# Altium footprint library FootPrintLib_7.PcbLib: 358 footprints (part 2 of 24)
Each footprint in its own frame and in the unit in brackets; x right, y up, seen from the top. Pads: shape width x height; smd on the part's side, far side on the other; paste and mask are expansions set on the pad; w line width, h text height; cw(c..) or ccw(c..) is an arc to the next point about the centre after c.
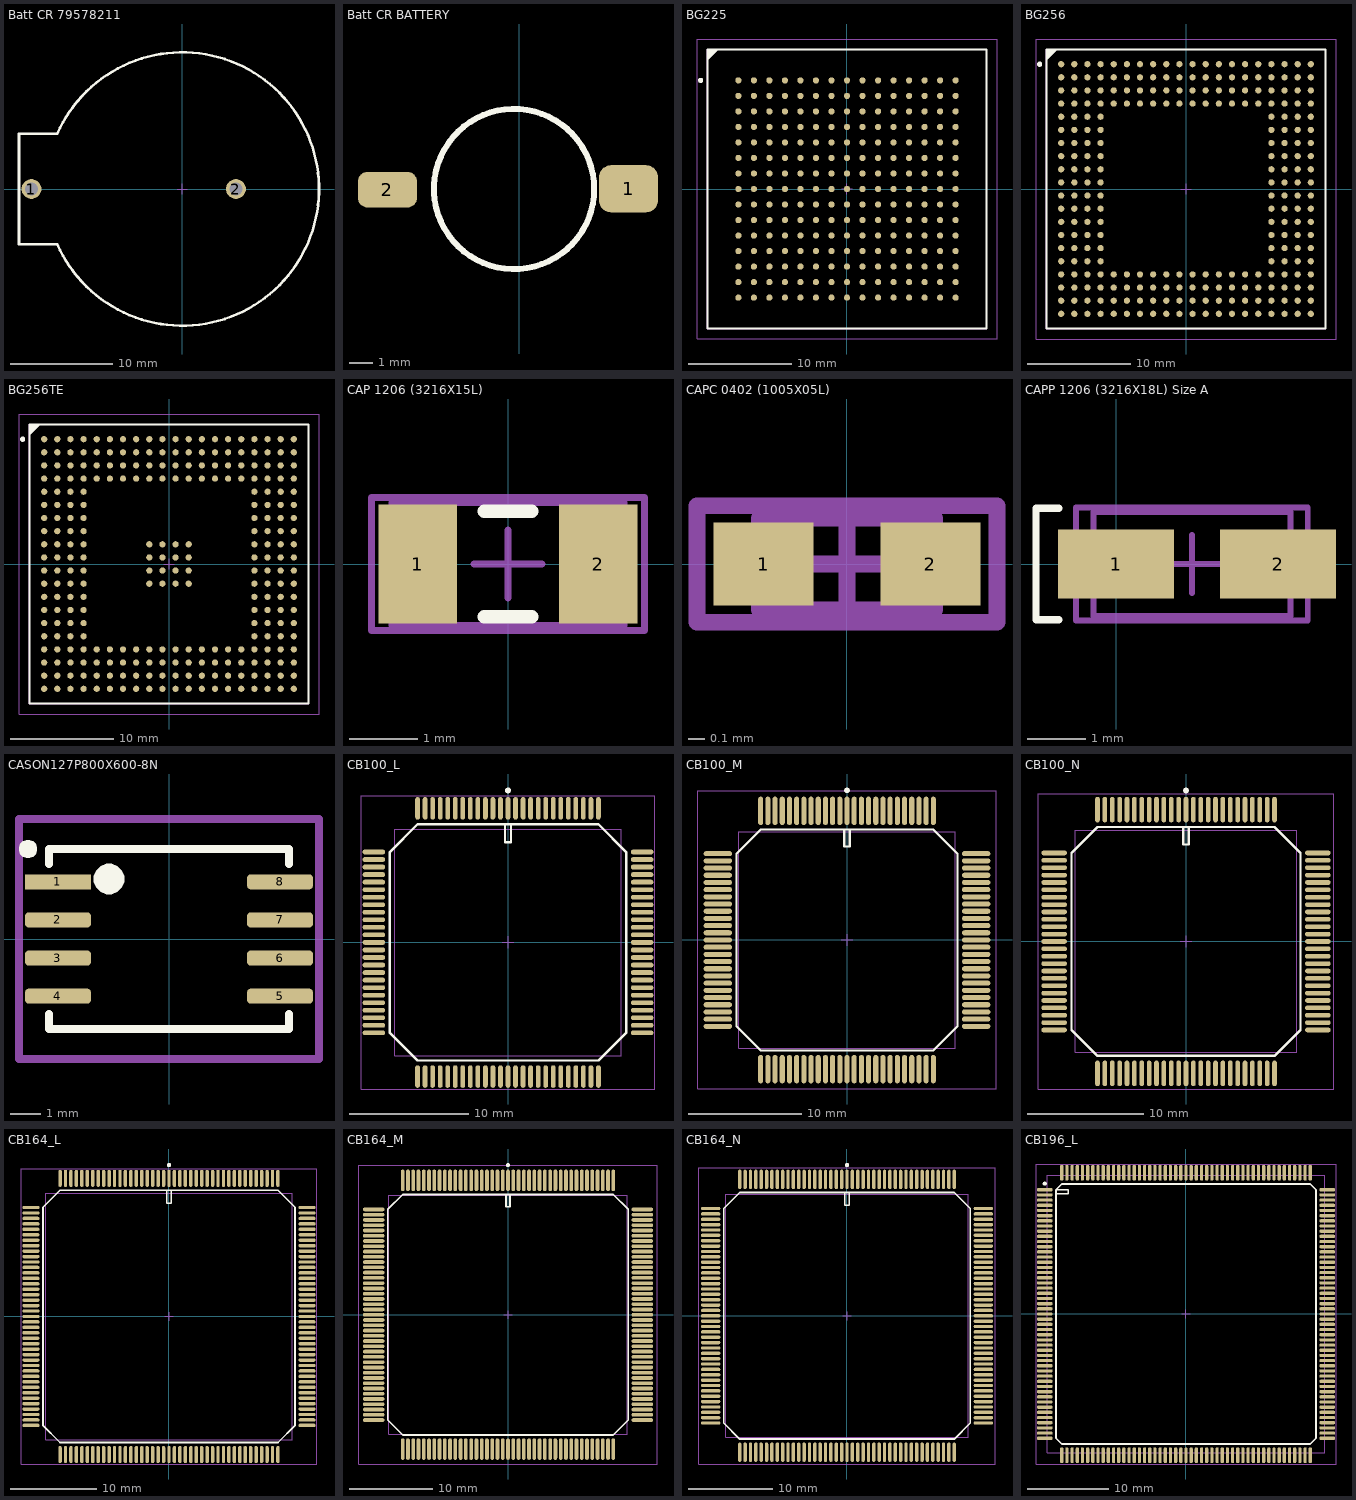
[diagram p1: the footprints below, top view; thin cyan lines are the x and y axes]

## Batt CR 79578211 [mm] "Battery Holder"
height 9.5
pads (2):
  round 1.95 hole 1.3: 1(-14.755,0) 2(5.245,0)
Top Overlay:
  lines w0.254: -12.236,-5.4 ccw(c0,0) -12.237,5.399 ; -12.237,5.4 -15.975,5.4 -15.975,-5.4 -12.236,-5.4
Mechanical 15:
  lines w0.1: -0.5,0 0.5,0 ; 0,-0.5 0,0.5
3D body "79578211.stp": height 9.6, standoff -3.2, extent -15.97,-13.375 13.327,13.375

## Batt CR BATTERY [mm]
pads (2):
  rrect50% 2.5x2 smd: 1(4.63,10.69)
  rrect50% 2.5x1.5 smd: 2(-5.6,10.65)
Top Overlay:
  circle w0.254: c-0.228,10.68 r3.4
3D body "battery_capacitor.STEP": height 2.07, standoff -0.01, extent -6.12,7.3 5.45,14.1

## BG225 [mm] "225-Ball Plastic Ball Grid Array (BG225)"
height 2.3
pads (225):
  round 0.6 smd: A1(-10.5,10.5) A2(-9,10.5) A3(-7.5,10.5) A4(-6,10.5) A5(-4.5,10.5) A6(-3,10.5) A7(-1.5,10.5) A8(0,10.5) A9(1.5,10.5) A10(3,10.5) A11(4.5,10.5) A12(6,10.5) A13(7.5,10.5) A14(9,10.5) A15(10.5,10.5) B1(-10.5,9) B2(-9,9) B3(-7.5,9) B4(-6,9) B5(-4.5,9) B6(-3,9) B7(-1.5,9) B8(0,9) B9(1.5,9) B10(3,9) B11(4.5,9) B12(6,9) B13(7.5,9) B14(9,9) B15(10.5,9) C1(-10.5,7.5) C2(-9,7.5) C3(-7.5,7.5) C4(-6,7.5) C5(-4.5,7.5) C6(-3,7.5) C7(-1.5,7.5) C8(0,7.5) C9(1.5,7.5) C10(3,7.5) C11(4.5,7.5) C12(6,7.5) C13(7.5,7.5) C14(9,7.5) C15(10.5,7.5) D1(-10.5,6) D2(-9,6) D3(-7.5,6) D4(-6,6) D5(-4.5,6) D6(-3,6) D7(-1.5,6) D8(0,6) D9(1.5,6) D10(3,6) D11(4.5,6) D12(6,6) D13(7.5,6) D14(9,6) D15(10.5,6) E1(-10.5,4.5) E2(-9,4.5) E3(-7.5,4.5) E4(-6,4.5) E5(-4.5,4.5) E6(-3,4.5) E7(-1.5,4.5) E8(0,4.5) E9(1.5,4.5) E10(3,4.5) E11(4.5,4.5) E12(6,4.5) E13(7.5,4.5) E14(9,4.5) E15(10.5,4.5) F1(-10.5,3) F2(-9,3) F3(-7.5,3) F4(-6,3) F5(-4.5,3) F6(-3,3) F7(-1.5,3) F8(0,3) F9(1.5,3) F10(3,3) F11(4.5,3) F12(6,3) F13(7.5,3) F14(9,3) F15(10.5,3) G1(-10.5,1.5) G2(-9,1.5) G3(-7.5,1.5) G4(-6,1.5) G5(-4.5,1.5) G6(-3,1.5) G7(-1.5,1.5) G8(0,1.5) G9(1.5,1.5) G10(3,1.5) G11(4.5,1.5) G12(6,1.5) G13(7.5,1.5) G14(9,1.5) G15(10.5,1.5) H1(-10.5,0) H2(-9,0) H3(-7.5,0) H4(-6,0) H5(-4.5,0) H6(-3,0) H7(-1.5,0) H8(0,0) H9(1.5,0) H10(3,0) H11(4.5,0) H12(6,0) H13(7.5,0) H14(9,0) H15(10.5,0) J1(-10.5,-1.5) J2(-9,-1.5) J3(-7.5,-1.5) J4(-6,-1.5) J5(-4.5,-1.5) J6(-3,-1.5) J7(-1.5,-1.5) J8(0,-1.5) J9(1.5,-1.5) J10(3,-1.5) J11(4.5,-1.5) J12(6,-1.5) J13(7.5,-1.5) J14(9,-1.5) J15(10.5,-1.5) K1(-10.5,-3) K2(-9,-3) K3(-7.5,-3) K4(-6,-3) K5(-4.5,-3) K6(-3,-3) K7(-1.5,-3) K8(0,-3) K9(1.5,-3) K10(3,-3) K11(4.5,-3) K12(6,-3) K13(7.5,-3) K14(9,-3) K15(10.5,-3) L1(-10.5,-4.5) L2(-9,-4.5) L3(-7.5,-4.5) L4(-6,-4.5) L5(-4.5,-4.5) L6(-3,-4.5) L7(-1.5,-4.5) L8(0,-4.5) L9(1.5,-4.5) L10(3,-4.5) L11(4.5,-4.5) L12(6,-4.5) L13(7.5,-4.5) L14(9,-4.5) L15(10.5,-4.5) M1(-10.5,-6) M2(-9,-6) M3(-7.5,-6) M4(-6,-6) M5(-4.5,-6) M6(-3,-6) M7(-1.5,-6) M8(0,-6) M9(1.5,-6) M10(3,-6) M11(4.5,-6) M12(6,-6) M13(7.5,-6) M14(9,-6) M15(10.5,-6) N1(-10.5,-7.5) N2(-9,-7.5) N3(-7.5,-7.5) N4(-6,-7.5) N5(-4.5,-7.5) N6(-3,-7.5) N7(-1.5,-7.5) N8(0,-7.5) N9(1.5,-7.5) N10(3,-7.5) N11(4.5,-7.5) N12(6,-7.5) N13(7.5,-7.5) N14(9,-7.5) N15(10.5,-7.5) P1(-10.5,-9) P2(-9,-9) P3(-7.5,-9) P4(-6,-9) P5(-4.5,-9) P6(-3,-9) P7(-1.5,-9) P8(0,-9) P9(1.5,-9) P10(3,-9) P11(4.5,-9) P12(6,-9) P13(7.5,-9) P14(9,-9) P15(10.5,-9) R1(-10.5,-10.5) R2(-9,-10.5) R3(-7.5,-10.5) R4(-6,-10.5) R5(-4.5,-10.5) R6(-3,-10.5) R7(-1.5,-10.5) R8(0,-10.5) R9(1.5,-10.5) R10(3,-10.5) R11(4.5,-10.5) R12(6,-10.5) R13(7.5,-10.5) R14(9,-10.5) R15(10.5,-10.5)
Top Overlay:
  circle w0.25: c-14.15,10.5 r0.125
  region: -12.5,13.5 -13.5,12.5 -13.5,13.5
  lines w0.2: -13.5,12.5 -12.5,13.5 ; -13.5,-13.5 -13.5,13.5 13.5,13.5 13.5,-13.5 -13.5,-13.5
Mechanical 13:
  lines w0.1: -13.5,-13.5 -13.5,13.5 13.5,13.5 13.5,-13.5 -13.5,-13.5
Mechanical 15:
  lines w0.1: -0.5,0 0.5,0 ; 0,-0.5 0,0.5 ; -14.5,-14.5 -14.5,14.5 14.5,14.5 14.5,-14.5 -14.5,-14.5
3D body: height 2.3, standoff 0, extent -13.5,-13.5 13.5,13.5

## BG256 [mm] "256-Ball Plastic Ball Grid Array (BG256)"
height 2.55
pads (256):
  round 0.6 smd: A1(-12.065,12.065) A2(-10.795,12.065) A3(-9.525,12.065) A4(-8.255,12.065) A5(-6.985,12.065) A6(-5.715,12.065) A7(-4.445,12.065) A8(-3.175,12.065) A9(-1.905,12.065) A10(-0.635,12.065) A11(0.635,12.065) A12(1.905,12.065) A13(3.175,12.065) A14(4.445,12.065) A15(5.715,12.065) A16(6.985,12.065) A17(8.255,12.065) A18(9.525,12.065) A19(10.795,12.065) A20(12.065,12.065) B1(-12.065,10.795) B2(-10.795,10.795) B3(-9.525,10.795) B4(-8.255,10.795) B5(-6.985,10.795) B6(-5.715,10.795) B7(-4.445,10.795) B8(-3.175,10.795) B9(-1.905,10.795) B10(-0.635,10.795) B11(0.635,10.795) B12(1.905,10.795) B13(3.175,10.795) B14(4.445,10.795) B15(5.715,10.795) B16(6.985,10.795) B17(8.255,10.795) B18(9.525,10.795) B19(10.795,10.795) B20(12.065,10.795) C1(-12.065,9.525) C2(-10.795,9.525) C3(-9.525,9.525) C4(-8.255,9.525) C5(-6.985,9.525) C6(-5.715,9.525) C7(-4.445,9.525) C8(-3.175,9.525) C9(-1.905,9.525) C10(-0.635,9.525) C11(0.635,9.525) C12(1.905,9.525) C13(3.175,9.525) C14(4.445,9.525) C15(5.715,9.525) C16(6.985,9.525) C17(8.255,9.525) C18(9.525,9.525) C19(10.795,9.525) C20(12.065,9.525) D1(-12.065,8.255) D2(-10.795,8.255) D3(-9.525,8.255) D4(-8.255,8.255) D5(-6.985,8.255) D6(-5.715,8.255) D7(-4.445,8.255) D8(-3.175,8.255) D9(-1.905,8.255) D10(-0.635,8.255) D11(0.635,8.255) D12(1.905,8.255) D13(3.175,8.255) D14(4.445,8.255) D15(5.715,8.255) D16(6.985,8.255) D17(8.255,8.255) D18(9.525,8.255) D19(10.795,8.255) D20(12.065,8.255) E1(-12.065,6.985) E2(-10.795,6.985) E3(-9.525,6.985) E4(-8.255,6.985) E17(8.255,6.985) E18(9.525,6.985) E19(10.795,6.985) E20(12.065,6.985) F1(-12.065,5.715) F2(-10.795,5.715) F3(-9.525,5.715) F4(-8.255,5.715) F17(8.255,5.715) F18(9.525,5.715) F19(10.795,5.715) F20(12.065,5.715) G1(-12.065,4.445) G2(-10.795,4.445) G3(-9.525,4.445) G4(-8.255,4.445) G17(8.255,4.445) G18(9.525,4.445) G19(10.795,4.445) G20(12.065,4.445) H1(-12.065,3.175) H2(-10.795,3.175) H3(-9.525,3.175) H4(-8.255,3.175) H17(8.255,3.175) H18(9.525,3.175) H19(10.795,3.175) H20(12.065,3.175) J1(-12.065,1.905) J2(-10.795,1.905) J3(-9.525,1.905) J4(-8.255,1.905) J17(8.255,1.905) J18(9.525,1.905) J19(10.795,1.905) J20(12.065,1.905) K1(-12.065,0.635) K2(-10.795,0.635) K3(-9.525,0.635) K4(-8.255,0.635) K17(8.255,0.635) K18(9.525,0.635) K19(10.795,0.635) K20(12.065,0.635) L1(-12.065,-0.635) L2(-10.795,-0.635) L3(-9.525,-0.635) L4(-8.255,-0.635) L17(8.255,-0.635) L18(9.525,-0.635) L19(10.795,-0.635) L20(12.065,-0.635) M1(-12.065,-1.905) M2(-10.795,-1.905) M3(-9.525,-1.905) M4(-8.255,-1.905) M17(8.255,-1.905) M18(9.525,-1.905) M19(10.795,-1.905) M20(12.065,-1.905) N1(-12.065,-3.175) N2(-10.795,-3.175) N3(-9.525,-3.175) N4(-8.255,-3.175) N17(8.255,-3.175) N18(9.525,-3.175) N19(10.795,-3.175) N20(12.065,-3.175) P1(-12.065,-4.445) P2(-10.795,-4.445) P3(-9.525,-4.445) P4(-8.255,-4.445) P17(8.255,-4.445) P18(9.525,-4.445) P19(10.795,-4.445) P20(12.065,-4.445) R1(-12.065,-5.715) R2(-10.795,-5.715) R3(-9.525,-5.715) R4(-8.255,-5.715) R17(8.255,-5.715) R18(9.525,-5.715) R19(10.795,-5.715) R20(12.065,-5.715) T1(-12.065,-6.985) T2(-10.795,-6.985) T3(-9.525,-6.985) T4(-8.255,-6.985) T17(8.255,-6.985) T18(9.525,-6.985) T19(10.795,-6.985) T20(12.065,-6.985) U1(-12.065,-8.255) U2(-10.795,-8.255) U3(-9.525,-8.255) U4(-8.255,-8.255) U5(-6.985,-8.255) U6(-5.715,-8.255) U7(-4.445,-8.255) U8(-3.175,-8.255) U9(-1.905,-8.255) U10(-0.635,-8.255) U11(0.635,-8.255) U12(1.905,-8.255) U13(3.175,-8.255) U14(4.445,-8.255) U15(5.715,-8.255) U16(6.985,-8.255) U17(8.255,-8.255) U18(9.525,-8.255) U19(10.795,-8.255) U20(12.065,-8.255) V1(-12.065,-9.525) V2(-10.795,-9.525) V3(-9.525,-9.525) V4(-8.255,-9.525) V5(-6.985,-9.525) V6(-5.715,-9.525) V7(-4.445,-9.525) V8(-3.175,-9.525) V9(-1.905,-9.525) V10(-0.635,-9.525) V11(0.635,-9.525) V12(1.905,-9.525) V13(3.175,-9.525) V14(4.445,-9.525) V15(5.715,-9.525) V16(6.985,-9.525) V17(8.255,-9.525) V18(9.525,-9.525) V19(10.795,-9.525) V20(12.065,-9.525) W1(-12.065,-10.795) W2(-10.795,-10.795) W3(-9.525,-10.795) W4(-8.255,-10.795) W5(-6.985,-10.795) W6(-5.715,-10.795) W7(-4.445,-10.795) W8(-3.175,-10.795) W9(-1.905,-10.795) W10(-0.635,-10.795) W11(0.635,-10.795) W12(1.905,-10.795) W13(3.175,-10.795) W14(4.445,-10.795) W15(5.715,-10.795) W16(6.985,-10.795) W17(8.255,-10.795) W18(9.525,-10.795) W19(10.795,-10.795) W20(12.065,-10.795) Y1(-12.065,-12.065) Y2(-10.795,-12.065) Y3(-9.525,-12.065) Y4(-8.255,-12.065) Y5(-6.985,-12.065) Y6(-5.715,-12.065) Y7(-4.445,-12.065) Y8(-3.175,-12.065) Y9(-1.905,-12.065) Y10(-0.635,-12.065) Y11(0.635,-12.065) Y12(1.905,-12.065) Y13(3.175,-12.065) Y14(4.445,-12.065) Y15(5.715,-12.065) Y16(6.985,-12.065) Y17(8.255,-12.065) Y18(9.525,-12.065) Y19(10.795,-12.065) Y20(12.065,-12.065)
Top Overlay:
  circle w0.25: c-14.15,12.065 r0.125
  region: -12.5,13.5 -13.5,12.5 -13.5,13.5
  lines w0.2: -13.5,12.5 -12.5,13.5 ; -13.5,-13.5 -13.5,13.5 13.5,13.5 13.5,-13.5 -13.5,-13.5
Mechanical 13:
  lines w0.1: -13.5,-13.5 -13.5,13.5 13.5,13.5 13.5,-13.5 -13.5,-13.5
Mechanical 15:
  lines w0.1: -0.5,0 0.5,0 ; 0,-0.5 0,0.5 ; -14.5,-14.5 -14.5,14.5 14.5,14.5 14.5,-14.5 -14.5,-14.5
3D body: height 2.55, standoff 0, extent -13.5,-13.5 13.5,13.5

## BG256TE [mm] "256-Ball Plastic Ball Grid Array (BG256) - Thermally Enhanced"
height 2.55
pads (272):
  round 0.6 smd: A1(-12.065,12.065) A2(-10.795,12.065) A3(-9.525,12.065) A4(-8.255,12.065) A5(-6.985,12.065) A6(-5.715,12.065) A7(-4.445,12.065) A8(-3.175,12.065) A9(-1.905,12.065) A10(-0.635,12.065) A11(0.635,12.065) A12(1.905,12.065) A13(3.175,12.065) A14(4.445,12.065) A15(5.715,12.065) A16(6.985,12.065) A17(8.255,12.065) A18(9.525,12.065) A19(10.795,12.065) A20(12.065,12.065) B1(-12.065,10.795) B2(-10.795,10.795) B3(-9.525,10.795) B4(-8.255,10.795) B5(-6.985,10.795) B6(-5.715,10.795) B7(-4.445,10.795) B8(-3.175,10.795) B9(-1.905,10.795) B10(-0.635,10.795) B11(0.635,10.795) B12(1.905,10.795) B13(3.175,10.795) B14(4.445,10.795) B15(5.715,10.795) B16(6.985,10.795) B17(8.255,10.795) B18(9.525,10.795) B19(10.795,10.795) B20(12.065,10.795) C1(-12.065,9.525) C2(-10.795,9.525) C3(-9.525,9.525) C4(-8.255,9.525) C5(-6.985,9.525) C6(-5.715,9.525) C7(-4.445,9.525) C8(-3.175,9.525) C9(-1.905,9.525) C10(-0.635,9.525) C11(0.635,9.525) C12(1.905,9.525) C13(3.175,9.525) C14(4.445,9.525) C15(5.715,9.525) C16(6.985,9.525) C17(8.255,9.525) C18(9.525,9.525) C19(10.795,9.525) C20(12.065,9.525) D1(-12.065,8.255) D2(-10.795,8.255) D3(-9.525,8.255) D4(-8.255,8.255) D5(-6.985,8.255) D6(-5.715,8.255) D7(-4.445,8.255) D8(-3.175,8.255) D9(-1.905,8.255) D10(-0.635,8.255) D11(0.635,8.255) D12(1.905,8.255) D13(3.175,8.255) D14(4.445,8.255) D15(5.715,8.255) D16(6.985,8.255) D17(8.255,8.255) D18(9.525,8.255) D19(10.795,8.255) D20(12.065,8.255) E1(-12.065,6.985) E2(-10.795,6.985) E3(-9.525,6.985) E4(-8.255,6.985) E17(8.255,6.985) E18(9.525,6.985) E19(10.795,6.985) E20(12.065,6.985) F1(-12.065,5.715) F2(-10.795,5.715) F3(-9.525,5.715) F4(-8.255,5.715) F17(8.255,5.715) F18(9.525,5.715) F19(10.795,5.715) F20(12.065,5.715) G1(-12.065,4.445) G2(-10.795,4.445) G3(-9.525,4.445) G4(-8.255,4.445) G17(8.255,4.445) G18(9.525,4.445) G19(10.795,4.445) G20(12.065,4.445) H1(-12.065,3.175) H2(-10.795,3.175) H3(-9.525,3.175) H4(-8.255,3.175) H17(8.255,3.175) H18(9.525,3.175) H19(10.795,3.175) H20(12.065,3.175) J1(-12.065,1.905) J2(-10.795,1.905) J3(-9.525,1.905) J4(-8.255,1.905) J9(-1.905,1.905) J10(-0.635,1.905) J11(0.635,1.905) J12(1.905,1.905) J17(8.255,1.905) J18(9.525,1.905) J19(10.795,1.905) J20(12.065,1.905) K1(-12.065,0.635) K2(-10.795,0.635) K3(-9.525,0.635) K4(-8.255,0.635) K9(-1.905,0.635) K10(-0.635,0.635) K11(0.635,0.635) K12(1.905,0.635) K17(8.255,0.635) K18(9.525,0.635) K19(10.795,0.635) K20(12.065,0.635) L1(-12.065,-0.635) L2(-10.795,-0.635) L3(-9.525,-0.635) L4(-8.255,-0.635) L9(-1.905,-0.635) L10(-0.635,-0.635) L11(0.635,-0.635) L12(1.905,-0.635) L17(8.255,-0.635) L18(9.525,-0.635) L19(10.795,-0.635) L20(12.065,-0.635) M1(-12.065,-1.905) M2(-10.795,-1.905) M3(-9.525,-1.905) M4(-8.255,-1.905) M9(-1.905,-1.905) M10(-0.635,-1.905) M11(0.635,-1.905) M12(1.905,-1.905) M17(8.255,-1.905) M18(9.525,-1.905) M19(10.795,-1.905) M20(12.065,-1.905) N1(-12.065,-3.175) N2(-10.795,-3.175) N3(-9.525,-3.175) N4(-8.255,-3.175) N17(8.255,-3.175) N18(9.525,-3.175) N19(10.795,-3.175) N20(12.065,-3.175) P1(-12.065,-4.445) P2(-10.795,-4.445) P3(-9.525,-4.445) P4(-8.255,-4.445) P17(8.255,-4.445) P18(9.525,-4.445) P19(10.795,-4.445) P20(12.065,-4.445) R1(-12.065,-5.715) R2(-10.795,-5.715) R3(-9.525,-5.715) R4(-8.255,-5.715) R17(8.255,-5.715) R18(9.525,-5.715) R19(10.795,-5.715) R20(12.065,-5.715) T1(-12.065,-6.985) T2(-10.795,-6.985) T3(-9.525,-6.985) T4(-8.255,-6.985) T17(8.255,-6.985) T18(9.525,-6.985) T19(10.795,-6.985) T20(12.065,-6.985) U1(-12.065,-8.255) U2(-10.795,-8.255) U3(-9.525,-8.255) U4(-8.255,-8.255) U5(-6.985,-8.255) U6(-5.715,-8.255) U7(-4.445,-8.255) U8(-3.175,-8.255) U9(-1.905,-8.255) U10(-0.635,-8.255) U11(0.635,-8.255) U12(1.905,-8.255) U13(3.175,-8.255) U14(4.445,-8.255) U15(5.715,-8.255) U16(6.985,-8.255) U17(8.255,-8.255) U18(9.525,-8.255) U19(10.795,-8.255) U20(12.065,-8.255) V1(-12.065,-9.525) V2(-10.795,-9.525) V3(-9.525,-9.525) V4(-8.255,-9.525) V5(-6.985,-9.525) V6(-5.715,-9.525) V7(-4.445,-9.525) V8(-3.175,-9.525) V9(-1.905,-9.525) V10(-0.635,-9.525) V11(0.635,-9.525) V12(1.905,-9.525) V13(3.175,-9.525) V14(4.445,-9.525) V15(5.715,-9.525) V16(6.985,-9.525) V17(8.255,-9.525) V18(9.525,-9.525) V19(10.795,-9.525) V20(12.065,-9.525) W1(-12.065,-10.795) W2(-10.795,-10.795) W3(-9.525,-10.795) W4(-8.255,-10.795) W5(-6.985,-10.795) W6(-5.715,-10.795) W7(-4.445,-10.795) W8(-3.175,-10.795) W9(-1.905,-10.795) W10(-0.635,-10.795) W11(0.635,-10.795) W12(1.905,-10.795) W13(3.175,-10.795) W14(4.445,-10.795) W15(5.715,-10.795) W16(6.985,-10.795) W17(8.255,-10.795) W18(9.525,-10.795) W19(10.795,-10.795) W20(12.065,-10.795) Y1(-12.065,-12.065) Y2(-10.795,-12.065) Y3(-9.525,-12.065) Y4(-8.255,-12.065) Y5(-6.985,-12.065) Y6(-5.715,-12.065) Y7(-4.445,-12.065) Y8(-3.175,-12.065) Y9(-1.905,-12.065) Y10(-0.635,-12.065) Y11(0.635,-12.065) Y12(1.905,-12.065) Y13(3.175,-12.065) Y14(4.445,-12.065) Y15(5.715,-12.065) Y16(6.985,-12.065) Y17(8.255,-12.065) Y18(9.525,-12.065) Y19(10.795,-12.065) Y20(12.065,-12.065)
Top Overlay:
  circle w0.25: c-14.15,12.065 r0.125
  region: -12.5,13.5 -13.5,12.5 -13.5,13.5
  lines w0.2: -13.5,12.5 -12.5,13.5 ; -13.5,-13.5 -13.5,13.5 13.5,13.5 13.5,-13.5 -13.5,-13.5
Mechanical 13:
  lines w0.1: -13.5,-13.5 -13.5,13.5 13.5,13.5 13.5,-13.5 -13.5,-13.5
Mechanical 15:
  lines w0.1: -0.5,0 0.5,0 ; 0,-0.5 0,0.5 ; -14.5,-14.5 -14.5,14.5 14.5,14.5 14.5,-14.5 -14.5,-14.5
3D body: height 2.55, standoff 0, extent -13.5,-13.5 13.5,13.5

## CAP 1206 (3216X15L) [mm] "Chip Capacitor, 2-Leads, Body 3.2x1.6mm, IPC High Density"
height 1.52
pads (2):
  rect 1.15x1.75 smd: 1(-1.325,0) 2(1.325,0)
Top Overlay:
  lines w0.2: -0.35,-0.775 0.35,-0.775 ; -0.35,0.775 0.35,0.775
Mechanical 13:
  lines w0.1: -1.7,-0.9 1.7,-0.9 1.7,0.9 -1.7,0.9 -1.7,-0.9
Mechanical 15:
  lines w0.1: -0.5,0 0.5,0 ; 0,-0.5 0,0.5 ; -2,-0.975 2,-0.975 2,0.975 -2,0.975 -2,-0.975
3D body "1206 cap.STEP": height 1, standoff 0, extent -1.6,-0.8 1.6,0.8

## CAPC 0402 (1005X05L) [mm] "Chip Capacitor, 2-Leads, Body 1.0x0.5mm, IPC High Density"
height 0.5
pads (2):
  rect 0.6x0.5 smd: 1(-0.5,0) 2(0.5,0)
Mechanical 13:
  lines w0.1: -0.525,-0.275 0.525,-0.275 0.525,0.275 -0.525,0.275 -0.525,-0.275
Mechanical 15:
  lines w0.1: -0.275,0 0.275,0 ; 0,-0.275 0,0.275 ; -0.9,-0.35 0.9,-0.35 0.9,0.35 -0.9,0.35 -0.9,-0.35
3D body: height 0.5, standoff 0, extent -0.525,-0.275 0.525,0.275

## CAPP 1206 (3216X18L) Size A [mm] "Chip Capacitor, 2-Leads, Body 3.2x1.6mm, IPC High Density, chip Tantalum"
height 1.8
pads (2):
  rect 1.999x1.199 smd: 1(0,0) 2(2.8,0)
Top Overlay:
  lines w0.127: -0.988,-0.965 -1.382,-0.965 -1.382,0.965 -0.988,0.965
Mechanical 13:
  lines w0.1: -0.389,-0.9 -0.389,0.9 3.011,0.9 3.011,-0.9 -0.389,-0.9
Mechanical 15:
  lines w0.1: 0.811,0 1.811,0 ; 1.311,-0.5 1.311,0.5 ; -0.689,-0.975 3.311,-0.975 3.311,0.975 -0.689,0.975 -0.689,-0.975
3D body "SW3dPS-Solid Tantalum Chip Capacitor Size (A-3216-18).STEP": height 1.8, standoff 0, extent -0.429,-0.902 3.21,0.902

## CASON127P800X600-8N [mm] "Chip Array Small Outline No Lead Package (CASON) , 8Leads , Body 6 x 8 x 1 mm , 1.27 mm Pitch"
height 1
pads (8):
  rect 2.2x0.5 smd: 1(-3.7,1.905)
  rrect50% 2.2x0.5 smd: 2(-3.7,0.635) 3(-3.7,-0.635) 4(-3.7,-1.905) 5(3.7,-1.905) 6(3.7,-0.635) 7(3.7,0.635) 8(3.7,1.905)
Top Overlay:
  region: -2,1.5 -2.099,1.5 -2.283,1.576 -2.424,1.717 -2.5,1.901 -2.5,2 -2.5,2.099 -2.424,2.283 -2.283,2.424 -2.099,2.5 -2,2.5 -1.901,2.5 -1.717,2.424 -1.576,2.283 -1.5,2.099 -1.5,2 -1.5,1.901 -1.576,1.717 -1.717,1.576 -1.901,1.5
  region: -4.7,2.7 -4.76,2.7 -4.87,2.746 -4.954,2.83 -5,2.94 -5,3 -5,3.06 -4.954,3.17 -4.87,3.254 -4.76,3.3 -4.7,3.3 -4.64,3.3 -4.53,3.254 -4.446,3.17 -4.4,3.06 -4.4,3 -4.4,2.94 -4.446,2.83 -4.53,2.746 -4.64,2.7
  lines w0.254: -4,-2.5 -4,-3 4,-3 4,-2.5 ; -4,2.5 -4,3 4,3 4,2.5
Mechanical 15:
  lines w0.254: -5,-4 5,-4 5,4 -5,4 -5,-4
3D body: height 1, standoff 0.5, extent -3.298,1.701 -2.7,2.299
3D body: height 1, standoff 0.17, extent -4,-3 4,3

## CB100_L [mm] "100-Pin Ceramic Brazed Quad Flat Pack (CB100), IPC High Density"
height 3.5
pads (100):
  oval 0.4x1.9 smd: 1(0,11.3) 2(-0.635,11.3) 3(-1.27,11.3) 4(-1.905,11.3) 5(-2.54,11.3) 6(-3.175,11.3) 7(-3.81,11.3) 8(-4.445,11.3) 9(-5.08,11.3) 10(-5.715,11.3) 11(-6.35,11.3) 12(-6.985,11.3) 13(-7.62,11.3) 39(-7.62,-11.3) 40(-6.985,-11.3) 41(-6.35,-11.3) 42(-5.715,-11.3) 43(-5.08,-11.3) 44(-4.445,-11.3) 45(-3.81,-11.3) 46(-3.175,-11.3) 47(-2.54,-11.3) 48(-1.905,-11.3) 49(-1.27,-11.3) 50(-0.635,-11.3) 51(0,-11.3) 52(0.635,-11.3) 53(1.27,-11.3) 54(1.905,-11.3) 55(2.54,-11.3) 56(3.175,-11.3) 57(3.81,-11.3) 58(4.445,-11.3) 59(5.08,-11.3) 60(5.715,-11.3) 61(6.35,-11.3) 62(6.985,-11.3) 63(7.62,-11.3) 89(7.62,11.3) 90(6.985,11.3) 91(6.35,11.3) 92(5.715,11.3) 93(5.08,11.3) 94(4.445,11.3) 95(3.81,11.3) 96(3.175,11.3) 97(2.54,11.3) 98(1.905,11.3) 99(1.27,11.3) 100(0.635,11.3)
  oval 1.9x0.4 smd: 14(-11.3,7.62) 15(-11.3,6.985) 16(-11.3,6.35) 17(-11.3,5.715) 18(-11.3,5.08) 19(-11.3,4.445) 20(-11.3,3.81) 21(-11.3,3.175) 22(-11.3,2.54) 23(-11.3,1.905) 24(-11.3,1.27) 25(-11.3,0.635) 26(-11.3,0) 27(-11.3,-0.635) 28(-11.3,-1.27) 29(-11.3,-1.905) 30(-11.3,-2.54) 31(-11.3,-3.175) 32(-11.3,-3.81) 33(-11.3,-4.445) 34(-11.3,-5.08) 35(-11.3,-5.715) 36(-11.3,-6.35) 37(-11.3,-6.985) 38(-11.3,-7.62) 64(11.3,-7.62) 65(11.3,-6.985) 66(11.3,-6.35) 67(11.3,-5.715) 68(11.3,-5.08) 69(11.3,-4.445) 70(11.3,-3.81) 71(11.3,-3.175) 72(11.3,-2.54) 73(11.3,-1.905) 74(11.3,-1.27) 75(11.3,-0.635) 76(11.3,0) 77(11.3,0.635) 78(11.3,1.27) 79(11.3,1.905) 80(11.3,2.54) 81(11.3,3.175) 82(11.3,3.81) 83(11.3,4.445) 84(11.3,5.08) 85(11.3,5.715) 86(11.3,6.35) 87(11.3,6.985) 88(11.3,7.62)
Top Overlay:
  circle w0.25: c0,12.8 r0.125
  lines w0.2: -0.25,9.95 -0.25,8.45 0.25,8.45 0.25,9.95 ; -9.95,-7.62 -7.62,-9.95 7.62,-9.95 9.95,-7.62 9.95,7.62 7.62,9.95 -7.62,9.95 -9.95,7.62 -9.95,-7.62
Mechanical 13:
  lines w0.1: -9.555,-9.555 9.555,-9.555 9.555,9.555 -9.555,9.555 -9.555,-9.555
Mechanical 15:
  lines w0.1: -0.5,0 0.5,0 ; 0,-0.5 0,0.5 ; -12.35,-12.35 12.35,-12.35 12.35,12.35 -12.35,12.35 -12.35,-12.35
3D body: height 3.5, standoff 0, extent -9.555,-9.555 9.555,9.555

## CB100_M [mm] "100-Pin Ceramic Brazed Quad Flat Pack (CB100), IPC Low Density"
height 3.5
pads (100):
  oval 0.45x2.5 smd: 1(0,11.4) 2(-0.635,11.4) 3(-1.27,11.4) 4(-1.905,11.4) 5(-2.54,11.4) 6(-3.175,11.4) 7(-3.81,11.4) 8(-4.445,11.4) 9(-5.08,11.4) 10(-5.715,11.4) 11(-6.35,11.4) 12(-6.985,11.4) 13(-7.62,11.4) 39(-7.62,-11.4) 40(-6.985,-11.4) 41(-6.35,-11.4) 42(-5.715,-11.4) 43(-5.08,-11.4) 44(-4.445,-11.4) 45(-3.81,-11.4) 46(-3.175,-11.4) 47(-2.54,-11.4) 48(-1.905,-11.4) 49(-1.27,-11.4) 50(-0.635,-11.4) 51(0,-11.4) 52(0.635,-11.4) 53(1.27,-11.4) 54(1.905,-11.4) 55(2.54,-11.4) 56(3.175,-11.4) 57(3.81,-11.4) 58(4.445,-11.4) 59(5.08,-11.4) 60(5.715,-11.4) 61(6.35,-11.4) 62(6.985,-11.4) 63(7.62,-11.4) 89(7.62,11.4) 90(6.985,11.4) 91(6.35,11.4) 92(5.715,11.4) 93(5.08,11.4) 94(4.445,11.4) 95(3.81,11.4) 96(3.175,11.4) 97(2.54,11.4) 98(1.905,11.4) 99(1.27,11.4) 100(0.635,11.4)
  oval 2.5x0.45 smd: 14(-11.4,7.62) 15(-11.4,6.985) 16(-11.4,6.35) 17(-11.4,5.715) 18(-11.4,5.08) 19(-11.4,4.445) 20(-11.4,3.81) 21(-11.4,3.175) 22(-11.4,2.54) 23(-11.4,1.905) 24(-11.4,1.27) 25(-11.4,0.635) 26(-11.4,0) 27(-11.4,-0.635) 28(-11.4,-1.27) 29(-11.4,-1.905) 30(-11.4,-2.54) 31(-11.4,-3.175) 32(-11.4,-3.81) 33(-11.4,-4.445) 34(-11.4,-5.08) 35(-11.4,-5.715) 36(-11.4,-6.35) 37(-11.4,-6.985) 38(-11.4,-7.62) 64(11.4,-7.62) 65(11.4,-6.985) 66(11.4,-6.35) 67(11.4,-5.715) 68(11.4,-5.08) 69(11.4,-4.445) 70(11.4,-3.81) 71(11.4,-3.175) 72(11.4,-2.54) 73(11.4,-1.905) 74(11.4,-1.27) 75(11.4,-0.635) 76(11.4,0) 77(11.4,0.635) 78(11.4,1.27) 79(11.4,1.905) 80(11.4,2.54) 81(11.4,3.175) 82(11.4,3.81) 83(11.4,4.445) 84(11.4,5.08) 85(11.4,5.715) 86(11.4,6.35) 87(11.4,6.985) 88(11.4,7.62)
Top Overlay:
  circle w0.25: c0,13.2 r0.125
  lines w0.2: -0.25,9.75 -0.25,8.25 0.25,8.25 0.25,9.75 ; -9.75,-7.62 -9.75,7.62 -7.62,9.75 7.62,9.75 9.75,7.62 9.75,-7.62 7.62,-9.75 -7.62,-9.75 -9.75,-7.62
Mechanical 13:
  lines w0.1: -9.555,-9.555 -9.555,9.555 9.555,9.555 9.555,-9.555 -9.555,-9.555
Mechanical 15:
  lines w0.1: -0.5,0 0.5,0 ; 0,-0.5 0,0.5 ; -13.15,-13.15 -13.15,13.15 13.15,13.15 13.15,-13.15 -13.15,-13.15
3D body: height 3.5, standoff 0, extent -9.555,-9.555 9.555,9.555

## CB100_N [mm] "100-Pin Ceramic Brazed Quad Flat Pack (CB100), IPC Medium Density"
height 3.5
pads (100):
  oval 0.4x2.2 smd: 1(0,11.35) 2(-0.635,11.35) 3(-1.27,11.35) 4(-1.905,11.35) 5(-2.54,11.35) 6(-3.175,11.35) 7(-3.81,11.35) 8(-4.445,11.35) 9(-5.08,11.35) 10(-5.715,11.35) 11(-6.35,11.35) 12(-6.985,11.35) 13(-7.62,11.35) 39(-7.62,-11.35) 40(-6.985,-11.35) 41(-6.35,-11.35) 42(-5.715,-11.35) 43(-5.08,-11.35) 44(-4.445,-11.35) 45(-3.81,-11.35) 46(-3.175,-11.35) 47(-2.54,-11.35) 48(-1.905,-11.35) 49(-1.27,-11.35) 50(-0.635,-11.35) 51(0,-11.35) 52(0.635,-11.35) 53(1.27,-11.35) 54(1.905,-11.35) 55(2.54,-11.35) 56(3.175,-11.35) 57(3.81,-11.35) 58(4.445,-11.35) 59(5.08,-11.35) 60(5.715,-11.35) 61(6.35,-11.35) 62(6.985,-11.35) 63(7.62,-11.35) 89(7.62,11.35) 90(6.985,11.35) 91(6.35,11.35) 92(5.715,11.35) 93(5.08,11.35) 94(4.445,11.35) 95(3.81,11.35) 96(3.175,11.35) 97(2.54,11.35) 98(1.905,11.35) 99(1.27,11.35) 100(0.635,11.35)
  oval 2.2x0.4 smd: 14(-11.35,7.62) 15(-11.35,6.985) 16(-11.35,6.35) 17(-11.35,5.715) 18(-11.35,5.08) 19(-11.35,4.445) 20(-11.35,3.81) 21(-11.35,3.175) 22(-11.35,2.54) 23(-11.35,1.905) 24(-11.35,1.27) 25(-11.35,0.635) 26(-11.35,0) 27(-11.35,-0.635) 28(-11.35,-1.27) 29(-11.35,-1.905) 30(-11.35,-2.54) 31(-11.35,-3.175) 32(-11.35,-3.81) 33(-11.35,-4.445) 34(-11.35,-5.08) 35(-11.35,-5.715) 36(-11.35,-6.35) 37(-11.35,-6.985) 38(-11.35,-7.62) 64(11.35,-7.62) 65(11.35,-6.985) 66(11.35,-6.35) 67(11.35,-5.715) 68(11.35,-5.08) 69(11.35,-4.445) 70(11.35,-3.81) 71(11.35,-3.175) 72(11.35,-2.54) 73(11.35,-1.905) 74(11.35,-1.27) 75(11.35,-0.635) 76(11.35,0) 77(11.35,0.635) 78(11.35,1.27) 79(11.35,1.905) 80(11.35,2.54) 81(11.35,3.175) 82(11.35,3.81) 83(11.35,4.445) 84(11.35,5.08) 85(11.35,5.715) 86(11.35,6.35) 87(11.35,6.985) 88(11.35,7.62)
Top Overlay:
  circle w0.25: c0,13 r0.125
  lines w0.2: -0.25,9.85 -0.25,8.35 0.25,8.35 0.25,9.85 ; -9.85,-7.62 -7.62,-9.85 7.62,-9.85 9.85,-7.62 9.85,7.62 7.62,9.85 -7.62,9.85 -9.85,7.62 -9.85,-7.62
Mechanical 13:
  lines w0.1: -9.555,-9.555 9.555,-9.555 9.555,9.555 -9.555,9.555 -9.555,-9.555
Mechanical 15:
  lines w0.1: -0.5,0 0.5,0 ; 0,-0.5 0,0.5 ; -12.7,-12.7 12.7,-12.7 12.7,12.7 -12.7,12.7 -12.7,-12.7
3D body: height 3.5, standoff 0, extent -9.555,-9.555 9.555,9.555

## CB164_L [mm] "164-Pin Ceramic Brazed Quad Flat Pack (CB164), IPC High Density"
height 3.4
pads (164):
  oval 0.4x2 smd: 1(0,16.1) 2(-0.635,16.1) 3(-1.27,16.1) 4(-1.905,16.1) 5(-2.54,16.1) 6(-3.175,16.1) 7(-3.81,16.1) 8(-4.445,16.1) 9(-5.08,16.1) 10(-5.715,16.1) 11(-6.35,16.1) 12(-6.985,16.1) 13(-7.62,16.1) 14(-8.255,16.1) 15(-8.89,16.1) 16(-9.525,16.1) 17(-10.16,16.1) 18(-10.795,16.1) 19(-11.43,16.1) 20(-12.065,16.1) 21(-12.7,16.1) 63(-12.7,-16.1) 64(-12.065,-16.1) 65(-11.43,-16.1) 66(-10.795,-16.1) 67(-10.16,-16.1) 68(-9.525,-16.1) 69(-8.89,-16.1) 70(-8.255,-16.1) 71(-7.62,-16.1) 72(-6.985,-16.1) 73(-6.35,-16.1) 74(-5.715,-16.1) 75(-5.08,-16.1) 76(-4.445,-16.1) 77(-3.81,-16.1) 78(-3.175,-16.1) 79(-2.54,-16.1) 80(-1.905,-16.1) 81(-1.27,-16.1) 82(-0.635,-16.1) 83(0,-16.1) 84(0.635,-16.1) 85(1.27,-16.1) 86(1.905,-16.1) 87(2.54,-16.1) 88(3.175,-16.1) 89(3.81,-16.1) 90(4.445,-16.1) 91(5.08,-16.1) 92(5.715,-16.1) 93(6.35,-16.1) 94(6.985,-16.1) 95(7.62,-16.1) 96(8.255,-16.1) 97(8.89,-16.1) 98(9.525,-16.1) 99(10.16,-16.1) 100(10.795,-16.1) 101(11.43,-16.1) 102(12.065,-16.1) 103(12.7,-16.1) 145(12.7,16.1) 146(12.065,16.1) 147(11.43,16.1) 148(10.795,16.1) 149(10.16,16.1) 150(9.525,16.1) 151(8.89,16.1) 152(8.255,16.1) 153(7.62,16.1) 154(6.985,16.1) 155(6.35,16.1) 156(5.715,16.1) 157(5.08,16.1) 158(4.445,16.1) 159(3.81,16.1) 160(3.175,16.1) 161(2.54,16.1) 162(1.905,16.1) 163(1.27,16.1) 164(0.635,16.1)
  oval 2x0.4 smd: 22(-16.1,12.7) 23(-16.1,12.065) 24(-16.1,11.43) 25(-16.1,10.795) 26(-16.1,10.16) 27(-16.1,9.525) 28(-16.1,8.89) 29(-16.1,8.255) 30(-16.1,7.62) 31(-16.1,6.985) 32(-16.1,6.35) 33(-16.1,5.715) 34(-16.1,5.08) 35(-16.1,4.445) 36(-16.1,3.81) 37(-16.1,3.175) 38(-16.1,2.54) 39(-16.1,1.905) 40(-16.1,1.27) 41(-16.1,0.635) 42(-16.1,0) 43(-16.1,-0.635) 44(-16.1,-1.27) 45(-16.1,-1.905) 46(-16.1,-2.54) 47(-16.1,-3.175) 48(-16.1,-3.81) 49(-16.1,-4.445) 50(-16.1,-5.08) 51(-16.1,-5.715) 52(-16.1,-6.35) 53(-16.1,-6.985) 54(-16.1,-7.62) 55(-16.1,-8.255) 56(-16.1,-8.89) 57(-16.1,-9.525) 58(-16.1,-10.16) 59(-16.1,-10.795) 60(-16.1,-11.43) 61(-16.1,-12.065) 62(-16.1,-12.7) 104(16.1,-12.7) 105(16.1,-12.065) 106(16.1,-11.43) 107(16.1,-10.795) 108(16.1,-10.16) 109(16.1,-9.525) 110(16.1,-8.89) 111(16.1,-8.255) 112(16.1,-7.62) 113(16.1,-6.985) 114(16.1,-6.35) 115(16.1,-5.715) 116(16.1,-5.08) 117(16.1,-4.445) 118(16.1,-3.81) 119(16.1,-3.175) 120(16.1,-2.54) 121(16.1,-1.905) 122(16.1,-1.27) 123(16.1,-0.635) 124(16.1,0) 125(16.1,0.635) 126(16.1,1.27) 127(16.1,1.905) 128(16.1,2.54) 129(16.1,3.175) 130(16.1,3.81) 131(16.1,4.445) 132(16.1,5.08) 133(16.1,5.715) 134(16.1,6.35) 135(16.1,6.985) 136(16.1,7.62) 137(16.1,8.255) 138(16.1,8.89) 139(16.1,9.525) 140(16.1,10.16) 141(16.1,10.795) 142(16.1,11.43) 143(16.1,12.065) 144(16.1,12.7)
Top Overlay:
  circle w0.25: c0,17.65 r0.125
  lines w0.2: -0.25,14.7 -0.25,13.2 0.25,13.2 0.25,14.7 ; -14.7,-12.7 -12.7,-14.7 12.7,-14.7 14.7,-12.7 14.7,12.7 12.7,14.7 -12.7,14.7 -14.7,12.7 -14.7,-12.7
Mechanical 13:
  lines w0.1: -14.385,-14.385 14.385,-14.385 14.385,14.385 -14.385,14.385 -14.385,-14.385
Mechanical 15:
  lines w0.1: -0.5,0 0.5,0 ; 0,-0.5 0,0.5 ; -17.2,-17.2 17.2,-17.2 17.2,17.2 -17.2,17.2 -17.2,-17.2
3D body: height 3.4, standoff 0, extent -14.385,-14.385 14.385,14.385

## CB164_M [mm] "164-Pin Ceramic Brazed Quad Flat Pack (CB164), IPC Low Density"
height 3.4
pads (164):
  oval 0.45x2.6 smd: 1(0,16.2) 2(-0.635,16.2) 3(-1.27,16.2) 4(-1.905,16.2) 5(-2.54,16.2) 6(-3.175,16.2) 7(-3.81,16.2) 8(-4.445,16.2) 9(-5.08,16.2) 10(-5.715,16.2) 11(-6.35,16.2) 12(-6.985,16.2) 13(-7.62,16.2) 14(-8.255,16.2) 15(-8.89,16.2) 16(-9.525,16.2) 17(-10.16,16.2) 18(-10.795,16.2) 19(-11.43,16.2) 20(-12.065,16.2) 21(-12.7,16.2) 63(-12.7,-16.2) 64(-12.065,-16.2) 65(-11.43,-16.2) 66(-10.795,-16.2) 67(-10.16,-16.2) 68(-9.525,-16.2) 69(-8.89,-16.2) 70(-8.255,-16.2) 71(-7.62,-16.2) 72(-6.985,-16.2) 73(-6.35,-16.2) 74(-5.715,-16.2) 75(-5.08,-16.2) 76(-4.445,-16.2) 77(-3.81,-16.2) 78(-3.175,-16.2) 79(-2.54,-16.2) 80(-1.905,-16.2) 81(-1.27,-16.2) 82(-0.635,-16.2) 83(0,-16.2) 84(0.635,-16.2) 85(1.27,-16.2) 86(1.905,-16.2) 87(2.54,-16.2) 88(3.175,-16.2) 89(3.81,-16.2) 90(4.445,-16.2) 91(5.08,-16.2) 92(5.715,-16.2) 93(6.35,-16.2) 94(6.985,-16.2) 95(7.62,-16.2) 96(8.255,-16.2) 97(8.89,-16.2) 98(9.525,-16.2) 99(10.16,-16.2) 100(10.795,-16.2) 101(11.43,-16.2) 102(12.065,-16.2) 103(12.7,-16.2) 145(12.7,16.2) 146(12.065,16.2) 147(11.43,16.2) 148(10.795,16.2) 149(10.16,16.2) 150(9.525,16.2) 151(8.89,16.2) 152(8.255,16.2) 153(7.62,16.2) 154(6.985,16.2) 155(6.35,16.2) 156(5.715,16.2) 157(5.08,16.2) 158(4.445,16.2) 159(3.81,16.2) 160(3.175,16.2) 161(2.54,16.2) 162(1.905,16.2) 163(1.27,16.2) 164(0.635,16.2)
  oval 2.6x0.45 smd: 22(-16.2,12.7) 23(-16.2,12.065) 24(-16.2,11.43) 25(-16.2,10.795) 26(-16.2,10.16) 27(-16.2,9.525) 28(-16.2,8.89) 29(-16.2,8.255) 30(-16.2,7.62) 31(-16.2,6.985) 32(-16.2,6.35) 33(-16.2,5.715) 34(-16.2,5.08) 35(-16.2,4.445) 36(-16.2,3.81) 37(-16.2,3.175) 38(-16.2,2.54) 39(-16.2,1.905) 40(-16.2,1.27) 41(-16.2,0.635) 42(-16.2,0) 43(-16.2,-0.635) 44(-16.2,-1.27) 45(-16.2,-1.905) 46(-16.2,-2.54) 47(-16.2,-3.175) 48(-16.2,-3.81) 49(-16.2,-4.445) 50(-16.2,-5.08) 51(-16.2,-5.715) 52(-16.2,-6.35) 53(-16.2,-6.985) 54(-16.2,-7.62) 55(-16.2,-8.255) 56(-16.2,-8.89) 57(-16.2,-9.525) 58(-16.2,-10.16) 59(-16.2,-10.795) 60(-16.2,-11.43) 61(-16.2,-12.065) 62(-16.2,-12.7) 104(16.2,-12.7) 105(16.2,-12.065) 106(16.2,-11.43) 107(16.2,-10.795) 108(16.2,-10.16) 109(16.2,-9.525) 110(16.2,-8.89) 111(16.2,-8.255) 112(16.2,-7.62) 113(16.2,-6.985) 114(16.2,-6.35) 115(16.2,-5.715) 116(16.2,-5.08) 117(16.2,-4.445) 118(16.2,-3.81) 119(16.2,-3.175) 120(16.2,-2.54) 121(16.2,-1.905) 122(16.2,-1.27) 123(16.2,-0.635) 124(16.2,0) 125(16.2,0.635) 126(16.2,1.27) 127(16.2,1.905) 128(16.2,2.54) 129(16.2,3.175) 130(16.2,3.81) 131(16.2,4.445) 132(16.2,5.08) 133(16.2,5.715) 134(16.2,6.35) 135(16.2,6.985) 136(16.2,7.62) 137(16.2,8.255) 138(16.2,8.89) 139(16.2,9.525) 140(16.2,10.16) 141(16.2,10.795) 142(16.2,11.43) 143(16.2,12.065) 144(16.2,12.7)
Top Overlay:
  circle w0.25: c0,18.05 r0.125
  lines w0.2: -0.25,14.5 -0.25,13 0.25,13 0.25,14.5 ; -14.5,-12.7 -14.5,12.7 -12.7,14.5 12.7,14.5 14.5,12.7 14.5,-12.7 12.7,-14.5 -12.7,-14.5 -14.5,-12.7
Mechanical 13:
  lines w0.1: -14.385,-14.385 -14.385,14.385 14.385,14.385 14.385,-14.385 -14.385,-14.385
Mechanical 15:
  lines w0.1: -0.5,0 0.5,0 ; 0,-0.5 0,0.5 ; -18,-18 -18,18 18,18 18,-18 -18,-18
3D body: height 3.4, standoff 0, extent -14.385,-14.385 14.385,14.385

## CB164_N [mm] "164-Pin Ceramic Brazed Quad Flat Pack (CB164), IPC Medium Density"
height 3.4
pads (164):
  oval 0.4x2.3 smd: 1(0,16.15) 2(-0.635,16.15) 3(-1.27,16.15) 4(-1.905,16.15) 5(-2.54,16.15) 6(-3.175,16.15) 7(-3.81,16.15) 8(-4.445,16.15) 9(-5.08,16.15) 10(-5.715,16.15) 11(-6.35,16.15) 12(-6.985,16.15) 13(-7.62,16.15) 14(-8.255,16.15) 15(-8.89,16.15) 16(-9.525,16.15) 17(-10.16,16.15) 18(-10.795,16.15) 19(-11.43,16.15) 20(-12.065,16.15) 21(-12.7,16.15) 63(-12.7,-16.15) 64(-12.065,-16.15) 65(-11.43,-16.15) 66(-10.795,-16.15) 67(-10.16,-16.15) 68(-9.525,-16.15) 69(-8.89,-16.15) 70(-8.255,-16.15) 71(-7.62,-16.15) 72(-6.985,-16.15) 73(-6.35,-16.15) 74(-5.715,-16.15) 75(-5.08,-16.15) 76(-4.445,-16.15) 77(-3.81,-16.15) 78(-3.175,-16.15) 79(-2.54,-16.15) 80(-1.905,-16.15) 81(-1.27,-16.15) 82(-0.635,-16.15) 83(0,-16.15) 84(0.635,-16.15) 85(1.27,-16.15) 86(1.905,-16.15) 87(2.54,-16.15) 88(3.175,-16.15) 89(3.81,-16.15) 90(4.445,-16.15) 91(5.08,-16.15) 92(5.715,-16.15) 93(6.35,-16.15) 94(6.985,-16.15) 95(7.62,-16.15) 96(8.255,-16.15) 97(8.89,-16.15) 98(9.525,-16.15) 99(10.16,-16.15) 100(10.795,-16.15) 101(11.43,-16.15) 102(12.065,-16.15) 103(12.7,-16.15) 145(12.7,16.15) 146(12.065,16.15) 147(11.43,16.15) 148(10.795,16.15) 149(10.16,16.15) 150(9.525,16.15) 151(8.89,16.15) 152(8.255,16.15) 153(7.62,16.15) 154(6.985,16.15) 155(6.35,16.15) 156(5.715,16.15) 157(5.08,16.15) 158(4.445,16.15) 159(3.81,16.15) 160(3.175,16.15) 161(2.54,16.15) 162(1.905,16.15) 163(1.27,16.15) 164(0.635,16.15)
  oval 2.3x0.4 smd: 22(-16.15,12.7) 23(-16.15,12.065) 24(-16.15,11.43) 25(-16.15,10.795) 26(-16.15,10.16) 27(-16.15,9.525) 28(-16.15,8.89) 29(-16.15,8.255) 30(-16.15,7.62) 31(-16.15,6.985) 32(-16.15,6.35) 33(-16.15,5.715) 34(-16.15,5.08) 35(-16.15,4.445) 36(-16.15,3.81) 37(-16.15,3.175) 38(-16.15,2.54) 39(-16.15,1.905) 40(-16.15,1.27) 41(-16.15,0.635) 42(-16.15,0) 43(-16.15,-0.635) 44(-16.15,-1.27) 45(-16.15,-1.905) 46(-16.15,-2.54) 47(-16.15,-3.175) 48(-16.15,-3.81) 49(-16.15,-4.445) 50(-16.15,-5.08) 51(-16.15,-5.715) 52(-16.15,-6.35) 53(-16.15,-6.985) 54(-16.15,-7.62) 55(-16.15,-8.255) 56(-16.15,-8.89) 57(-16.15,-9.525) 58(-16.15,-10.16) 59(-16.15,-10.795) 60(-16.15,-11.43) 61(-16.15,-12.065) 62(-16.15,-12.7) 104(16.15,-12.7) 105(16.15,-12.065) 106(16.15,-11.43) 107(16.15,-10.795) 108(16.15,-10.16) 109(16.15,-9.525) 110(16.15,-8.89) 111(16.15,-8.255) 112(16.15,-7.62) 113(16.15,-6.985) 114(16.15,-6.35) 115(16.15,-5.715) 116(16.15,-5.08) 117(16.15,-4.445) 118(16.15,-3.81) 119(16.15,-3.175) 120(16.15,-2.54) 121(16.15,-1.905) 122(16.15,-1.27) 123(16.15,-0.635) 124(16.15,0) 125(16.15,0.635) 126(16.15,1.27) 127(16.15,1.905) 128(16.15,2.54) 129(16.15,3.175) 130(16.15,3.81) 131(16.15,4.445) 132(16.15,5.08) 133(16.15,5.715) 134(16.15,6.35) 135(16.15,6.985) 136(16.15,7.62) 137(16.15,8.255) 138(16.15,8.89) 139(16.15,9.525) 140(16.15,10.16) 141(16.15,10.795) 142(16.15,11.43) 143(16.15,12.065) 144(16.15,12.7)
Top Overlay:
  circle w0.25: c0,17.85 r0.125
  lines w0.2: -0.25,14.6 -0.25,13.1 0.25,13.1 0.25,14.6 ; -14.6,-12.7 -14.6,12.7 -12.7,14.6 12.7,14.6 14.6,12.7 14.6,-12.7 12.7,-14.6 -12.7,-14.6 -14.6,-12.7
Mechanical 13:
  lines w0.1: -14.385,-14.385 -14.385,14.385 14.385,14.385 14.385,-14.385 -14.385,-14.385
Mechanical 15:
  lines w0.1: -0.5,0 0.5,0 ; 0,-0.5 0,0.5 ; -17.55,-17.55 -17.55,17.55 17.55,17.55 17.55,-17.55 -17.55,-17.55
3D body: height 3.4, standoff 0, extent -14.385,-14.385 14.385,14.385

## CB196_L [mm] "196-Pin Ceramic Brazed Quad Flat Pack (CB196), IPC High Density"
height 3.4
pads (196):
  oval 1.95x0.4 smd: 1(-17.325,15.24) 2(-17.325,14.605) 3(-17.325,13.97) 4(-17.325,13.335) 5(-17.325,12.7) 6(-17.325,12.065) 7(-17.325,11.43) 8(-17.325,10.795) 9(-17.325,10.16) 10(-17.325,9.525) 11(-17.325,8.89) 12(-17.325,8.255) 13(-17.325,7.62) 14(-17.325,6.985) 15(-17.325,6.35) 16(-17.325,5.715) 17(-17.325,5.08) 18(-17.325,4.445) 19(-17.325,3.81) 20(-17.325,3.175) 21(-17.325,2.54) 22(-17.325,1.905) 23(-17.325,1.27) 24(-17.325,0.635) 25(-17.325,0) 26(-17.325,-0.635) 27(-17.325,-1.27) 28(-17.325,-1.905) 29(-17.325,-2.54) 30(-17.325,-3.175) 31(-17.325,-3.81) 32(-17.325,-4.445) 33(-17.325,-5.08) 34(-17.325,-5.715) 35(-17.325,-6.35) 36(-17.325,-6.985) 37(-17.325,-7.62) 38(-17.325,-8.255) 39(-17.325,-8.89) 40(-17.325,-9.525) 41(-17.325,-10.16) 42(-17.325,-10.795) 43(-17.325,-11.43) 44(-17.325,-12.065) 45(-17.325,-12.7) 46(-17.325,-13.335) 47(-17.325,-13.97) 48(-17.325,-14.605) 49(-17.325,-15.24) 99(17.325,-15.24) 100(17.325,-14.605) 101(17.325,-13.97) 102(17.325,-13.335) 103(17.325,-12.7) 104(17.325,-12.065) 105(17.325,-11.43) 106(17.325,-10.795) 107(17.325,-10.16) 108(17.325,-9.525) 109(17.325,-8.89) 110(17.325,-8.255) 111(17.325,-7.62) 112(17.325,-6.985) 113(17.325,-6.35) 114(17.325,-5.715) 115(17.325,-5.08) 116(17.325,-4.445) 117(17.325,-3.81) 118(17.325,-3.175) 119(17.325,-2.54) 120(17.325,-1.905) 121(17.325,-1.27) 122(17.325,-0.635) 123(17.325,0) 124(17.325,0.635) 125(17.325,1.27) 126(17.325,1.905) 127(17.325,2.54) 128(17.325,3.175) 129(17.325,3.81) 130(17.325,4.445) 131(17.325,5.08) 132(17.325,5.715) 133(17.325,6.35) 134(17.325,6.985) 135(17.325,7.62) 136(17.325,8.255) 137(17.325,8.89) 138(17.325,9.525) 139(17.325,10.16) 140(17.325,10.795) 141(17.325,11.43) 142(17.325,12.065) 143(17.325,12.7) 144(17.325,13.335) 145(17.325,13.97) 146(17.325,14.605) 147(17.325,15.24)
  oval 0.4x1.95 smd: 50(-15.24,-17.325) 51(-14.605,-17.325) 52(-13.97,-17.325) 53(-13.335,-17.325) 54(-12.7,-17.325) 55(-12.065,-17.325) 56(-11.43,-17.325) 57(-10.795,-17.325) 58(-10.16,-17.325) 59(-9.525,-17.325) 60(-8.89,-17.325) 61(-8.255,-17.325) 62(-7.62,-17.325) 63(-6.985,-17.325) 64(-6.35,-17.325) 65(-5.715,-17.325) 66(-5.08,-17.325) 67(-4.445,-17.325) 68(-3.81,-17.325) 69(-3.175,-17.325) 70(-2.54,-17.325) 71(-1.905,-17.325) 72(-1.27,-17.325) 73(-0.635,-17.325) 74(0,-17.325) 75(0.635,-17.325) 76(1.27,-17.325) 77(1.905,-17.325) 78(2.54,-17.325) 79(3.175,-17.325) 80(3.81,-17.325) 81(4.445,-17.325) 82(5.08,-17.325) 83(5.715,-17.325) 84(6.35,-17.325) 85(6.985,-17.325) 86(7.62,-17.325) 87(8.255,-17.325) 88(8.89,-17.325) 89(9.525,-17.325) 90(10.16,-17.325) 91(10.795,-17.325) 92(11.43,-17.325) 93(12.065,-17.325) 94(12.7,-17.325) 95(13.335,-17.325) 96(13.97,-17.325) 97(14.605,-17.325) 98(15.24,-17.325) 148(15.24,17.325) 149(14.605,17.325) 150(13.97,17.325) 151(13.335,17.325) 152(12.7,17.325) 153(12.065,17.325) 154(11.43,17.325) 155(10.795,17.325) 156(10.16,17.325) 157(9.525,17.325) 158(8.89,17.325) 159(8.255,17.325) 160(7.62,17.325) 161(6.985,17.325) 162(6.35,17.325) 163(5.715,17.325) 164(5.08,17.325) 165(4.445,17.325) 166(3.81,17.325) 167(3.175,17.325) 168(2.54,17.325) 169(1.905,17.325) 170(1.27,17.325) 171(0.635,17.325) 172(0,17.325) 173(-0.635,17.325) 174(-1.27,17.325) 175(-1.905,17.325) 176(-2.54,17.325) 177(-3.175,17.325) 178(-3.81,17.325) 179(-4.445,17.325) 180(-5.08,17.325) 181(-5.715,17.325) 182(-6.35,17.325) 183(-6.985,17.325) 184(-7.62,17.325) 185(-8.255,17.325) 186(-8.89,17.325) 187(-9.525,17.325) 188(-10.16,17.325) 189(-10.795,17.325) 190(-11.43,17.325) 191(-12.065,17.325) 192(-12.7,17.325) 193(-13.335,17.325) 194(-13.97,17.325) 195(-14.605,17.325) 196(-15.24,17.325)
Top Overlay:
  circle w0.25: c-17.325,15.99 r0.125
  lines w0.2: -15.95,14.74 -14.45,14.74 -14.45,15.24 -15.95,15.24 ; -15.95,15.24 -15.24,15.95 15.24,15.95 15.95,15.24 15.95,-15.24 15.24,-15.95 -15.24,-15.95 -15.95,-15.24 -15.95,15.24
Mechanical 13:
  lines w0.1: -17.025,-17.025 17.025,-17.025 17.025,17.025 -17.025,17.025 -17.025,-17.025
Mechanical 15:
  lines w0.1: -0.5,0 0.5,0 ; 0,-0.5 0,0.5 ; -18.4,-18.4 18.4,-18.4 18.4,18.4 -18.4,18.4 -18.4,-18.4
3D body: height 3.4, standoff 0, extent -17.025,-17.025 17.025,17.025